# EAGLE library part 6210XX245821_621020245821 (library WR-PHD)
WR-PHD 2.00 mm SMT Dual Pin Header Low Profile Article Properties Pins 4 unitless; 6 unitless; 8 unitless; 10 unitless; 14 unitless; 16 unitless; 20 unitless; 24 unitless General Information Operating Temperature -40 °C up to +105 °C Compliance Lead free / RoHS Pitch 2 mm Durability 50 Cycles Rows Dual Gender Pin Header Type Straight Low Profile Material Properties Insulator Material PA9T Insulator Flammability Rating UL94 V-0 Contact Material Copper Alloy Contact Plating Gold Contact Type Stamped Certification UL Approval E323964 Packaging Properties Packaging Tape and Reel with Cap; Tube Electrical Properties IR 2 A Withstanding Voltage 500 V (AC) Contact Resistance 20 mΩ RISO 1000 MΩ <https://www.we-online.com/components/media/o57944v209%20Family_SMD_Low%20Profile_621xxx245821.jpg> Details see: www.we-online.com/en/components/products/PHD_2_00_SMT_DUAL_PIN_HEADER_LOW_PROFILE_6210XX245821 <www.we-online.com/en/components/products/PHD_2_00_SMT_DUAL_PIN_HEADER_LOW_PROFILE_6210XX245821/?utm_source=eagle_model&utm_medium=description_link&utm_campaign=eisos_eagle> Updated by Ella 2024-01-31 2024 (C) Würth Elektronik
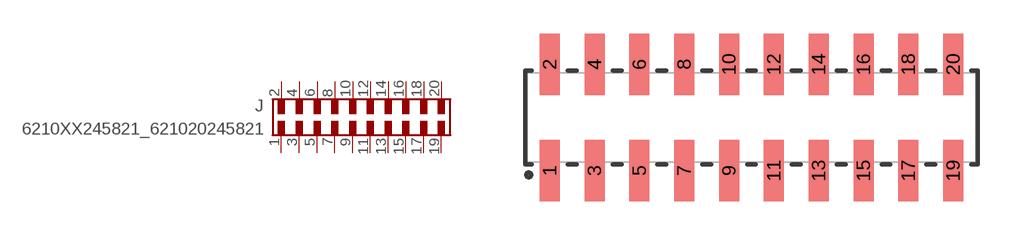
[diagram p313: symbol with the pads of 621020245821; footprint 621020245821]

Designator prefix J

## 6210XX245821_621020245821 (DATASHEET-URL: https://www.we-online.com/redexpert/spec/621020245821?ae; GENDER: Pin Header; IR: 2A; MOUNT: SMT; PACKAGING: Tube; PART-NUMBER: 621020245821; PINS: 20; PITCH: 2.00 mm; ROWS: Dual; TYPE: Straight Low Profile; VALUE: 621020245821)  [621020245821]
1  1  pas
2  2  pas
3  3  pas
4  4  pas
5  5  pas
6  6  pas
7  7  pas
8  8  pas
9  9  pas
10  10  pas
11  11  pas
12  12  pas
13  13  pas
14  14  pas
15  15  pas
16  16  pas
17  17  pas
18  18  pas
19  19  pas
20  20  pas

## Footprint 621020245821 (pad centres in mm)
WR-PHD 2.00 mm SMT Dual Pin Header Low Profile,20Pins
smd 0.89 x 2.75: 1 -9,-2.375; 2 -9,2.375; 3 -7,-2.375; 4 -7,2.375; 5 -5,-2.375; 6 -5,2.375; 7 -3,-2.375; 8 -3,2.375; 9 -1,-2.375; 10 -1,2.375; 11 1,-2.375; 12 1,2.375; 13 3,-2.375; 14 3,2.375; 15 5,-2.375; 16 5,2.375; 17 7,-2.375; 18 7,2.375; 19 9,-2.375; 20 9,2.375